# Altium footprint library Header_Pcb.PcbLib: 49 footprints (part 4 of 4)
Each footprint in its own frame and in the unit in brackets; x right, y up, seen from the top. Pads: shape width x height; smd on the part's side, far side on the other; paste and mask are expansions set on the pad; w line width, h text height; cw(c..) or ccw(c..) is an arc to the next point about the centre after c.
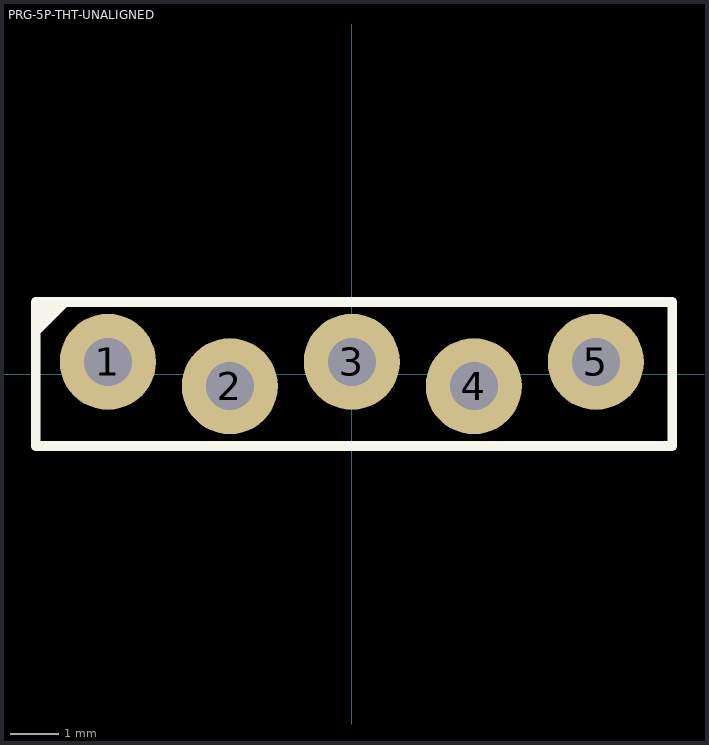
[diagram p3: the footprint, top view; thin cyan lines are the x and y axes]

## PRG-5P-THT-UNALIGNED [mm]
pads (5):
  round 2 hole 1: 1(-5.08,0.254) 2(-2.54,-0.254) 3(0,0.254) 4(2.54,-0.254) 5(5.08,0.254)
Top Overlay:
  region: -6.58,1.5 -5.83,1.5 -6.58,0.75
  lines w0.2: -6.58,-1.5 -6.58,1.5 6.67,1.5 6.67,-1.5 -6.58,-1.5
3D body "single_5p.stp": height 8.55, standoff -2.99, extent -6.35,-1.27 6.35,1.27